# Altium schematic symbol library 2019-12-03_23-05-25.SchLib: 2 symbols
Pins are listed as number, name and electrical type; pins without a type are passive.

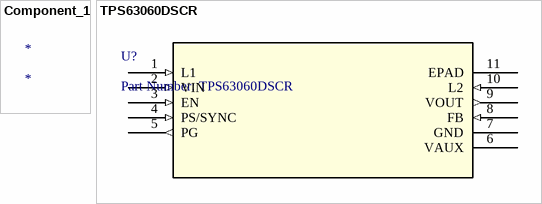
[diagram p0: symbols Component_1 to TPS63060DSCR]

## Component_1
designator *

## TPS63060DSCR
designator U?, comment Part Number: TPS63060DSCR
No Description Available; Vendor: Texas Instruments; Built_By: EMA_UL_Team; Manufacturer_Part_Number: TPS63060DSCR; Manufacturer: Texas Instruments; Copyright: Copyright (C) 2018 Accelerated Designs. All rights reserved; RefDes: RefDes; Type: DEV; Value: Value
footprint DSC10_1P70X2P15
pins: 1 L1 (in), 2 VIN (in), 3 EN (in), 4 PS/SYNC (in), 5 PG (out), 6 VAUX, 7 GND (power), 8 FB (in), 9 VOUT (out), 10 L2 (in), 11 EPAD